# Altium schematic symbol library Walter.SchLib: 1 symbol
Pins are listed as number, name and electrical type; pins without a type are passive.

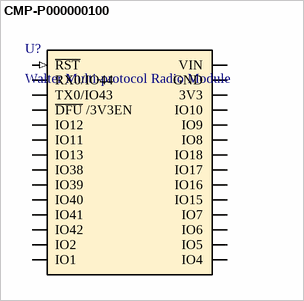
[diagram p0: symbol CMP-P000000100]

## CMP-P000000100
designator U?, comment Walter Multi-protocol Radio Module
Quickspot Walter Multi-protocol radio module - WiFi, BLE, NB-IoT, LTE-M, GNSS - 16MiB Flash. 2 MiB PSRAM, PCB Antenna; MPN: P000000100; MFR: DPTechnics; Datasheet: https://quickspot.io/datasheet/walter_datasheet.pdf; Mouser: 392-P000000100; Digikey: 6243-P000000100-ND
pins: 1 ~{RST} (in), 2 RX0/IO44 (io), 3 TX0/IO43 (io), 4 ~{DFU} /3V3EN (io), 5 IO12 (io), 6 IO11 (io), 7 IO13 (io), 8 IO38 (io), 9 IO39 (io), 10 IO40 (io), 11 IO41 (io), 12 IO42 (io), 13 IO2 (io), 14 IO1 (io), 15 IO4 (io), 16 IO5 (io), 17 IO6 (io), 18 IO7 (io), 19 IO15 (io), 20 IO16 (io), 21 IO17 (io), 22 IO18 (io), 23 IO8 (io), 24 IO9 (io), 25 IO10 (io), 26 3V3 (power), 27 GND (power), 28 VIN (power)